# Altium schematic symbol library MEMORY.SchLib: 1 symbol
Pins are listed as number, name and electrical type; pins without a type are passive.

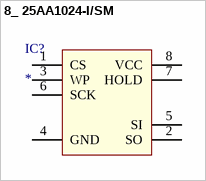
[diagram p0: symbol 8_ 25AA1024-I/SM]

## 8_ 25AA1024-I/SM
designator IC?
EEPROM, 1Mbit, SPI, max 20 MHz, 1.8V-5.5V; Supplier 1: Future Electronics; Supplier Part Number 1: 25AA1024-I/SM
footprint SOIC-8_ 25AA1024-I/SM (EEPROM, 1Mbit, SPI, max 20 MHz, 1.8V-5.5V)
pins: 1 CS, 2 SO, 3 WP, 4 GND, 5 SI, 6 SCK, 7 HOLD, 8 VCC